# Altium footprint library 2020-12-04_16-24-54.PcbLib: 1 footprints
Each footprint in its own frame and in the unit in brackets; x right, y up, seen from the top. Pads: shape width x height; smd on the part's side, far side on the other; paste and mask are expansions set on the pad; w line width, h text height; cw(c..) or ccw(c..) is an arc to the next point about the centre after c.
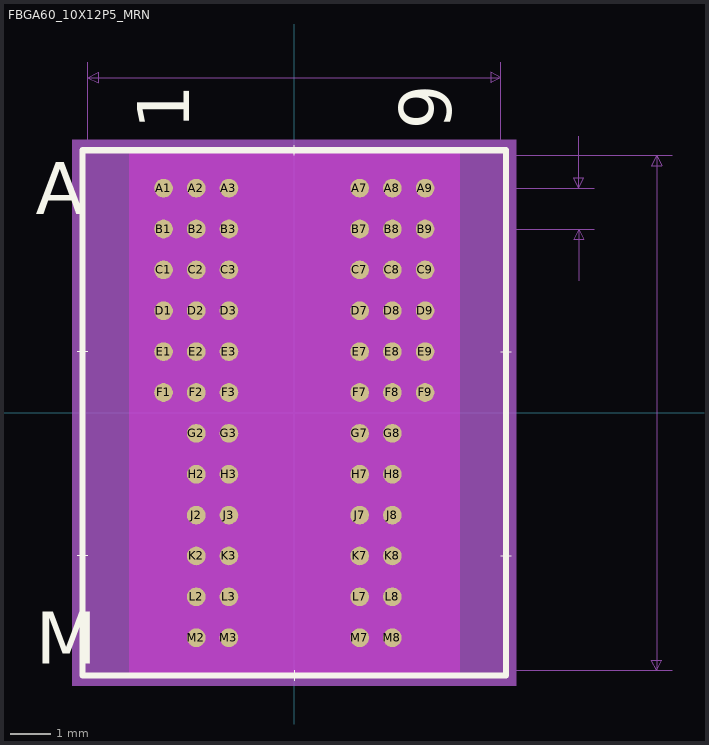
[diagram p0: the footprint, top view; thin cyan lines are the x and y axes]

## FBGA60_10X12P5_MRN [mm]
pads (60):
  round 0.457 smd paste+0 mask+0: A1(-3.2,5.5) A2(-2.4,5.5) A3(-1.6,5.5) A7(1.6,5.5) A8(2.4,5.5) A9(3.2,5.5) B1(-3.2,4.5) B2(-2.4,4.5) B3(-1.6,4.5) B7(1.6,4.5) B8(2.4,4.5) B9(3.2,4.5) C1(-3.2,3.5) C2(-2.4,3.5) C3(-1.6,3.5) C7(1.6,3.5) C8(2.4,3.5) C9(3.2,3.5) D1(-3.2,2.5) D2(-2.4,2.5) D3(-1.6,2.5) D7(1.6,2.5) D8(2.4,2.5) D9(3.2,2.5) E1(-3.2,1.5) E2(-2.4,1.5) E3(-1.6,1.5) E7(1.6,1.5) E8(2.4,1.5) E9(3.2,1.5) F1(-3.2,0.5) F2(-2.4,0.5) F3(-1.6,0.5) F7(1.6,0.5) F8(2.4,0.5) F9(3.2,0.5) G2(-2.4,-0.5) G3(-1.6,-0.5) G7(1.6,-0.5) G8(2.4,-0.5) H2(-2.4,-1.5) H3(-1.6,-1.5) H7(1.6,-1.5) H8(2.4,-1.5) J2(-2.4,-2.5) J3(-1.6,-2.5) J7(1.6,-2.5) J8(2.4,-2.5) K2(-2.4,-3.5) K3(-1.6,-3.5) K7(1.6,-3.5) K8(2.4,-3.5) L2(-2.4,-4.5) L3(-1.6,-4.5) L7(1.6,-4.5) L8(2.4,-4.5) M2(-2.4,-5.5) M3(-1.6,-5.5) M7(1.6,-5.5) M8(2.4,-5.5)
Top Overlay:
  lines w0.025: -5.309,-3.5 -5.055,-3.5 ; -5.309,1.5 -5.055,1.5 ; 0,-6.553 0,-6.299 ; 0,6.299 0,6.553 ; 5.055,-3.5 5.309,-3.5 ; 5.055,1.5 5.309,1.5
  lines w0.152: -5.182,-6.426 5.182,-6.426 5.182,6.426 -5.182,6.426 -5.182,-6.426
  text "A" at -6.325,4.865 h1.27
  text "M" at -6.325,-6.135 h1.27
  text "1" at -2.565,6.934 h1.27
  text "9" at 3.835,6.934 h1.27
Bottom Overlay:
  text "A" at -5.69,4.865 h1.27
  text "M" at -5.69,-6.135 h1.27
  text "1" at -3.835,6.934 h1.27
  text "9" at 2.565,6.934 h1.27
Keep-Out Layer:
  region: -4.045,-6.445 -4.045,6.445 4.045,6.445 4.045,-6.445
Mechanical 5:
  region: 5.436,-6.68 -5.436,-6.68 -5.436,6.68 5.436,6.68
Mechanical 7:
  lines w0.025: -5.055,0 -5.055,8.585 ; 0,-6.299 9.246,-6.299 ; 0,6.299 9.246,6.299 ; 3.2,4.5 7.341,4.5 ; 3.2,5.5 7.341,5.5 ; 5.055,0 5.055,8.585 ; 6.96,3.23 6.96,4.5 ; 6.96,6.77 6.96,5.5 ; -5.055,8.204 5.055,8.204 ; -5.055,8.204 -4.801,8.331 -4.801,8.077 -5.055,8.204 ; 5.055,8.204 4.801,8.331 4.801,8.077 5.055,8.204 ; 6.96,4.5 6.833,4.246 7.087,4.246 6.96,4.5 ; 6.96,5.5 6.833,5.754 7.087,5.754 6.96,5.5 ; 8.865,-6.299 8.865,6.299 ; 8.865,-6.299 8.738,-6.045 8.992,-6.045 8.865,-6.299 ; 8.865,6.299 8.738,6.045 8.992,6.045 8.865,6.299
  text "Default Padstyle: EX18Y18D0T" at -8.89,-11.379 h1.27
  text "0.039in/1mm" at 7.468,4.683 h0.64
  text "0.398in/10.109mm" at -2.54,8.712 h0.64
  text "0.496in/12.598mm" at 9.373,-0.318 h0.64
Mechanical 13:
  lines w0.025: -5.055,5.799 -4.655,6.299 ; -5.055,-6.299 5.055,-6.299 5.055,6.299 -5.055,6.299 -5.055,-6.299
  text "A" at -6.325,4.865 h1.27
  text "M" at -6.325,-6.135 h1.27
  text "1" at -2.565,6.934 h1.27
  text "9" at 3.835,6.934 h1.27
Mechanical 15:
  region: 5.309,-6.553 -5.309,-6.553 -5.309,6.553 5.309,6.553
  lines w0.152: -5.309,-6.553 -5.309,6.553 5.309,6.553 5.309,-6.553 -5.309,-6.553
3D body: height 0.25, standoff 0, extent 0,0 0.254,0.254